# Altium footprint library SM4-CON.PcbLib: 1 footprints
Each footprint in its own frame and in the unit in brackets; x right, y up, seen from the top. Pads: shape width x height; smd on the part's side, far side on the other; paste and mask are expansions set on the pad; w line width, h text height; cw(c..) or ccw(c..) is an arc to the next point about the centre after c.
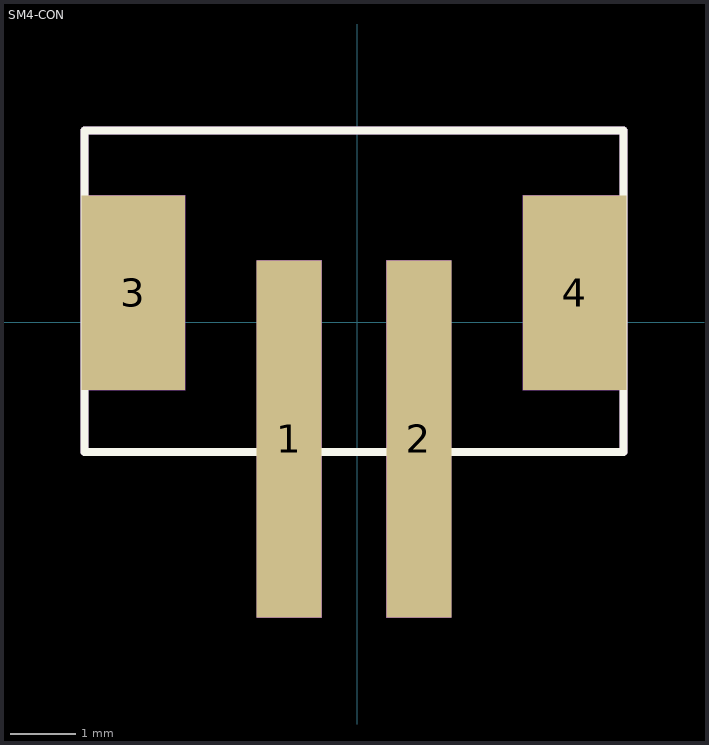
[diagram p0: the footprint, top view; thin cyan lines are the x and y axes]

## SM4-CON [mm]
pads (4):
  rect 1x5.5 smd: 1(-1.05,-1.8) 2(0.95,-1.8)
  rect 1.6x3 smd: 3(-3.45,0.45) 4(3.35,0.45)
Top Overlay:
  lines w0.127: -4.2,-2 -4.2,2.95 4.1,2.95 4.1,-2 -4.2,-2
Mechanical 13:
  region: 1.45,-4.55 0.45,-4.55 0.45,0.95 1.45,0.95
  region: -0.55,-4.55 -1.55,-4.55 -1.55,0.95 -0.55,0.95
  region: -2.65,-1.05 -4.15,-1.05 -4.15,1.95 -2.65,1.95
  region: 4.05,-1.05 2.55,-1.05 2.55,1.95 4.05,1.95
  lines w0.127: -4.2,-2 -4.2,2.95 4.1,2.95 4.1,-2 -4.2,-2
3D body "step_temp.STEP": height 6.75, standoff 0, extent -3.975,-4.119 3.975,2.881